# Altium footprint library Grant_..PcbLib: 73 footprints (part 5 of 5)
Each footprint in its own frame and in the unit in brackets; x right, y up, seen from the top. Pads: shape width x height; smd on the part's side, far side on the other; paste and mask are expansions set on the pad; w line width, h text height; cw(c..) or ccw(c..) is an arc to the next point about the centre after c.
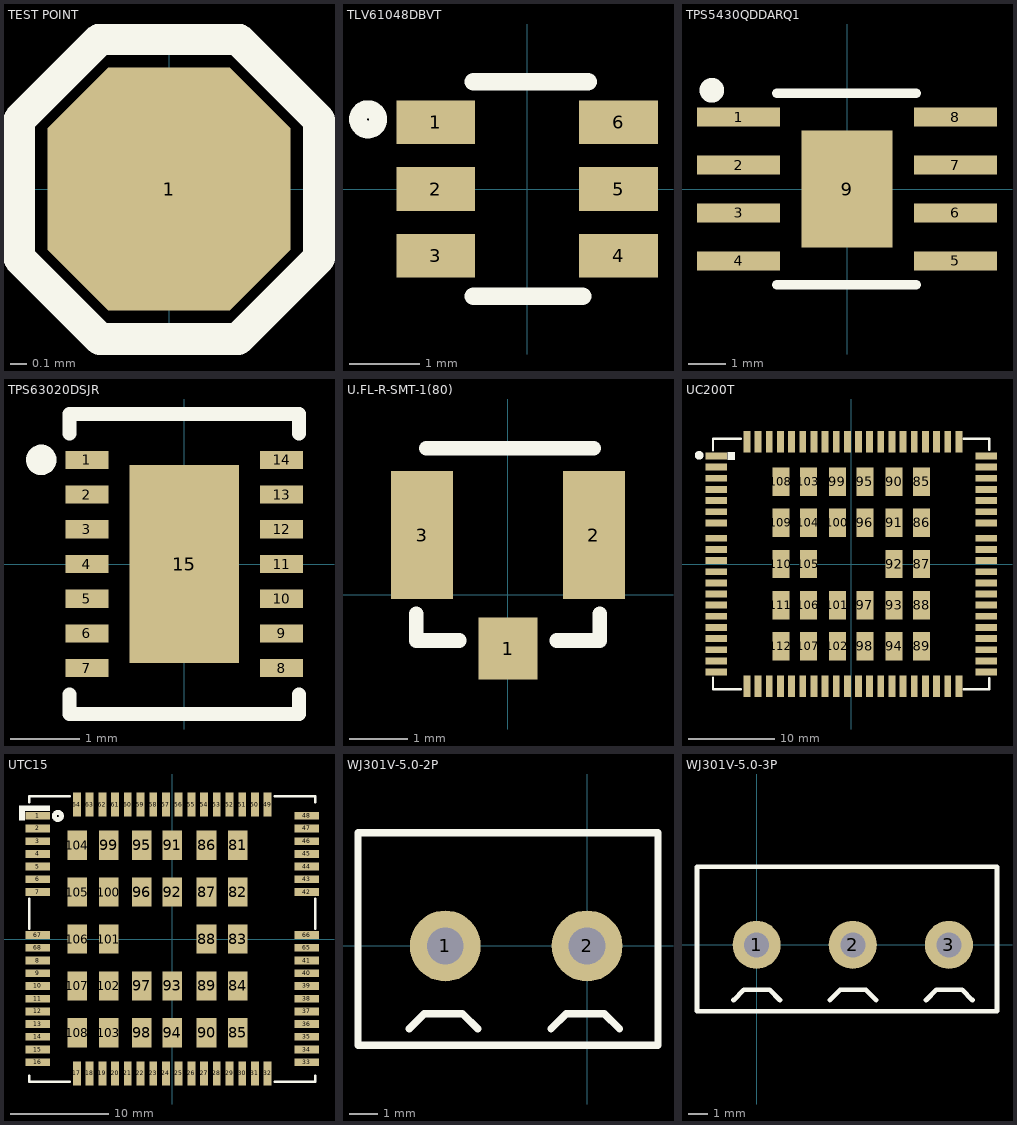
[diagram p4: the footprints below, top view; thin cyan lines are the x and y axes]

## TEST POINT [mil]
pads (1):
  oct 60x60 smd: 1(0,0)
Top Overlay:
  lines w7.87: -17,-37 17,-37 ; -17,-37 -37,-17 -37,17 -17,37 ; -17,-37 17,-37 ; -17,37 17,37 ; -17,37 17,37 ; 17,-37 37,-17 37,17 17,37

## TLV61048DBVT [mm]
pads (6):
  rect 1.12x0.62 smd: 1(-1.3,0.95) 2(-1.3,0) 3(-1.3,-0.95) 4(1.3,-0.95) 5(1.3,0) 6(1.3,0.95)
Top Overlay:
  circle w0.254: c-2.261,0.991 r0.144
  lines w0.254: -0.762,-1.524 0.787,-1.524 ; -0.762,1.524 0.864,1.524
3D body "User Library-SOT23-6-2.step": height 1.44, standoff -0.01, extent -1.4,-1.45 1.4,1.45

## TPS5430QDDARQ1 [mm]
pads (9):
  rect 2.2x0.5 smd: 1(-2.875,1.905) 2(-2.875,0.635) 3(-2.875,-0.635) 4(-2.875,-1.905) 5(2.875,-1.905) 6(2.875,-0.635) 7(2.875,0.635) 8(2.875,1.905)
  rect 2.4x3.1 smd: 9(0,0)
Top Overlay:
  circle w0.5: c-3.581,2.616 r0.076
  lines w0.254: -1.854,-2.54 1.829,-2.54 ; -1.854,2.54 1.829,2.54
3D body "LMR14050SDDAR--3DModel-STEP-56544.STEP": height 1.68, standoff -0.02, extent -3,-2.462 3,2.438

## TPS63020DSJR [mm]
pads (15):
  rect 0.62x0.26 smd: 1(-1.4,1.5) 2(-1.4,1) 3(-1.4,0.5) 4(-1.4,0) 5(-1.4,-0.5) 6(-1.4,-1) 7(-1.4,-1.5) 8(1.4,-1.5) 9(1.4,-1) 10(1.4,-0.5) 11(1.4,0) 12(1.4,0.5) 13(1.4,1) 14(1.4,1.5)
  rect 1.58x2.85 smd: 15(0,0)
Top Overlay:
  circle w0.254: c-2.057,1.499 r0.092
  lines w0.2: -1.651,-1.88 -1.651,-2.159 1.651,-2.159 1.651,-1.88 ; -1.651,1.88 -1.651,2.159 1.651,2.159 1.651,1.88
3D body "tps63020_asm.stp": height 0.98, standoff -0.02, extent -1.575,-2.075 1.575,2.075

## U.FL-R-SMT-1(80) [mm]
pads (3):
  rect 1.02x1.07 smd: 1(0,-0.923)
  rect 1.07x2.2 smd: 2(1.475,1.025) 3(-1.475,1.025)
Top Overlay:
  lines w0.254: -1.575,-0.33 -1.575,-0.787 -0.838,-0.787 ; -1.397,2.515 1.473,2.515 ; 0.838,-0.787 1.575,-0.787 1.575,-0.33
3D body "U.FL-R-SMT-1.stp": height 1.2, standoff -0.05, extent -1.475,-0.686 1.525,2.414

## UC200T [mm]
pads (108):
  rect 2.5x0.8 smd: 1(-15.75,12.6) 2(-15.75,11.3) 3(-15.75,10) 4(-15.75,8.7) 5(-15.75,7.4) 6(-15.75,6.1) 7(-15.75,4.8) 8(-15.75,0.4) 9(-15.75,-0.9) 10(-15.75,-2.2) 11(-15.75,-3.5) 12(-15.75,-4.8) 13(-15.75,-6.1) 14(-15.75,-7.4) 15(-15.75,-8.7) 16(-15.75,-10) 17(-15.75,-11.3) 18(-15.75,-12.6) 37(15.75,-12.6) 38(15.75,-11.3) 39(15.75,-10) 40(15.75,-8.7) 41(15.75,-7.4) 42(15.75,-6.1) 43(15.75,-4.8) 44(15.75,-3.5) 45(15.75,-2.2) 46(15.75,-0.9) 47(15.75,0.4) 48(15.75,4.8) 49(15.75,6.1) 50(15.75,7.4) 51(15.75,8.7) 52(15.75,10) 53(15.75,11.3) 54(15.75,12.6) 141(-15.75,3) 142(-15.75,1.7) 143(15.75,1.7) 144(15.75,3)
  rect 0.8x2.5 smd: 19(-9.55,-14.25) 20(-8.25,-14.25) 21(-6.95,-14.25) 22(-5.65,-14.25) 23(-4.35,-14.25) 24(-3.05,-14.25) 25(-1.75,-14.25) 26(-0.45,-14.25) 27(0.85,-14.25) 28(2.15,-14.25) 29(3.45,-14.25) 30(4.75,-14.25) 31(6.05,-14.25) 32(7.35,-14.25) 33(8.65,-14.25) 34(9.95,-14.25) 35(11.25,-14.25) 36(12.55,-14.25) 55(12.55,14.25) 56(11.25,14.25) 57(9.95,14.25) 58(8.65,14.25) 59(7.35,14.25) 60(6.05,14.25) 61(4.75,14.25) 62(3.45,14.25) 63(2.15,14.25) 64(0.85,14.25) 65(-0.45,14.25) 66(-1.75,14.25) 67(-3.05,14.25) 68(-4.35,14.25) 69(-5.65,14.25) 70(-6.95,14.25) 71(-8.25,14.25) 72(-9.55,14.25) 113(-10.85,14.25) 114(-12.15,14.25) 115(-10.85,-14.25) 116(-12.15,-14.25)
  rect 2x3.3 smd: 85(8.2,9.6) 86(8.2,4.8) 87(8.2,0) 88(8.2,-4.8) 89(8.2,-9.6) 90(5,9.6) 91(5,4.8) 92(5,0) 93(5,-4.8) 94(5,-9.6) 95(1.6,9.6) 96(1.6,4.8) 97(1.6,-4.8) 98(1.6,-9.6) 99(-1.6,9.6) 100(-1.6,4.8) 101(-1.6,-4.8) 102(-1.6,-9.6) 103(-5,9.6) 104(-5,4.8) 105(-5,0) 106(-5,-4.8) 107(-5,-9.6) 108(-8.2,9.6) 109(-8.2,4.8) 110(-8.2,0) 111(-8.2,-4.8) 112(-8.2,-9.6)
Top Overlay:
  circle w0.5: c-17.729,12.675 r0.254
  rectangle: -14.402,12.116 -13.564,13.081
  lines w0.254: -16.104,-13.259 -16.104,-14.605 -12.852,-14.605 ; -16.104,13.259 -16.104,14.605 -12.852,14.605 ; 13.132,-14.605 16.104,-14.605 16.104,-13.31 ; 13.132,14.605 16.104,14.605 16.104,13.31
3D body "uc200t-xx_asm.stp": height 2.4, standoff 0, extent -16,-14.5 16,14.5

## UTC15 [mm]
pads (96):
  rect 2.5x0.8 smd: 1(-13.75,12.6) 2(-13.75,11.3) 3(-13.75,10) 4(-13.75,8.7) 5(-13.75,7.4) 6(-13.75,6.1) 7(-13.75,4.8) 8(-13.75,-2.2) 9(-13.75,-3.5) 10(-13.75,-4.8) 11(-13.75,-6.1) 12(-13.75,-7.4) 13(-13.75,-8.7) 14(-13.75,-10) 15(-13.75,-11.3) 16(-13.75,-12.6) 33(13.75,-12.6) 34(13.75,-11.3) 35(13.75,-10) 36(13.75,-8.7) 37(13.75,-7.4) 38(13.75,-6.1) 39(13.75,-4.8) 40(13.75,-3.5) 41(13.75,-2.2) 42(13.75,4.8) 43(13.75,6.1) 44(13.75,7.4) 45(13.75,8.7) 46(13.75,10) 47(13.75,11.3) 48(13.75,12.6) 65(13.75,-0.9) 66(13.75,0.4) 67(-13.75,0.4) 68(-13.75,-0.9)
  rect 0.8x2.5 smd: 17(-9.75,-13.75) 18(-8.45,-13.75) 19(-7.15,-13.75) 20(-5.85,-13.75) 21(-4.55,-13.75) 22(-3.25,-13.75) 23(-1.95,-13.75) 24(-0.65,-13.75) 25(0.65,-13.75) 26(1.95,-13.75) 27(3.25,-13.75) 28(4.55,-13.75) 29(5.85,-13.75) 30(7.15,-13.75) 31(8.45,-13.75) 32(9.75,-13.75) 49(9.75,13.75) 50(8.45,13.75) 51(7.15,13.75) 52(5.85,13.75) 53(4.55,13.75) 54(3.25,13.75) 55(1.95,13.75) 56(0.65,13.75) 57(-0.65,13.75) 58(-1.95,13.75) 59(-3.25,13.75) 60(-4.55,13.75) 61(-5.85,13.75) 62(-7.15,13.75) 63(-8.45,13.75) 64(-9.75,13.75)
  rect 2x3 smd: 81(6.7,9.6) 82(6.7,4.8) 83(6.7,0) 84(6.7,-4.8) 85(6.7,-9.6) 86(3.5,9.6) 87(3.5,4.8) 88(3.5,0) 89(3.5,-4.8) 90(3.5,-9.6) 91(0,9.6) 92(0,4.8) 93(0,-4.8) 94(0,-9.6) 95(-3.1,9.6) 96(-3.1,4.8) 97(-3.1,-4.8) 98(-3.1,-9.6) 99(-6.5,9.6) 100(-6.5,4.8) 101(-6.5,0) 102(-6.5,-4.8) 103(-6.5,-9.6) 104(-9.7,9.6) 105(-9.7,4.8) 106(-9.7,0) 107(-9.7,-4.8) 108(-9.7,-9.6)
Top Overlay:
  circle w0.5: c-11.693,12.579 r0.366
  rectangle: -15.672,12.121 -15.071,13.544
  rectangle: -15.672,13.112 -12.506,13.671
  lines w0.254: -14.614,-13.997 -14.614,-14.607 -10.473,-14.607 ; -14.614,1.068 -14.614,4.116 ; -14.614,13.997 -14.614,14.607 -10.473,14.607 ; 10.473,-14.607 14.614,-14.607 14.614,-13.997 ; 10.473,14.607 14.614,14.607 14.614,13.997 ; 14.614,1.068 14.614,4.116
3D body "quectel_uc15_hd_module_v1_asm.stp": height 2.5, standoff 0, extent -14.5,-14.5 14.5,14.5

## WJ301V-5.0-2P [mm]
pads (2):
  round 2.5 hole 1.3: 1(-5,0) 2(0,0)
Top Overlay:
  lines w0.254: -6.27,-2.921 -5.737,-2.388 -4.39,-2.388 -3.857,-2.921 ; -1.27,-2.921 -0.737,-2.388 0.61,-2.388 1.143,-2.921 ; -8.075,-3.496 2.5,-3.496 2.5,0 2.5,3.988 -8.075,3.988 -8.075,-3.496
3D body "2-pin.stp": height 10, standoff -4.2, extent -8.1,-3.496 2.5,4.004

## WJ301V-5.0-3P [mm]
pads (3):
  round 2.5 hole 1.3: 1(0,0) 2(5,0) 3(10,0)
Top Overlay:
  lines w0.254: -1.194,-2.87 -0.66,-2.337 0.686,-2.337 1.219,-2.87 ; 3.806,-2.87 4.34,-2.337 5.686,-2.337 6.219,-2.87 ; 8.806,-2.87 9.34,-2.337 10.686,-2.337 11.219,-2.87 ; -3.099,-3.454 12.5,-3.454 12.5,0.016 12.5,4.064 -3.099,4.064 -3.099,-3.454
3D body: height 0.25, standoff 0, extent -2.413,3.708 12.497,3.785
3D body "3-pin.stp": height 10, standoff -4.2, extent -3.1,-3.445 12.5,4.054